# Altium footprint library PcbLib1.PcbLib: 21 footprints (part 1 of 2)
Each footprint in its own frame and in the unit in brackets; x right, y up, seen from the top. Pads: shape width x height; smd on the part's side, far side on the other; paste and mask are expansions set on the pad; w line width, h text height; cw(c..) or ccw(c..) is an arc to the next point about the centre after c.
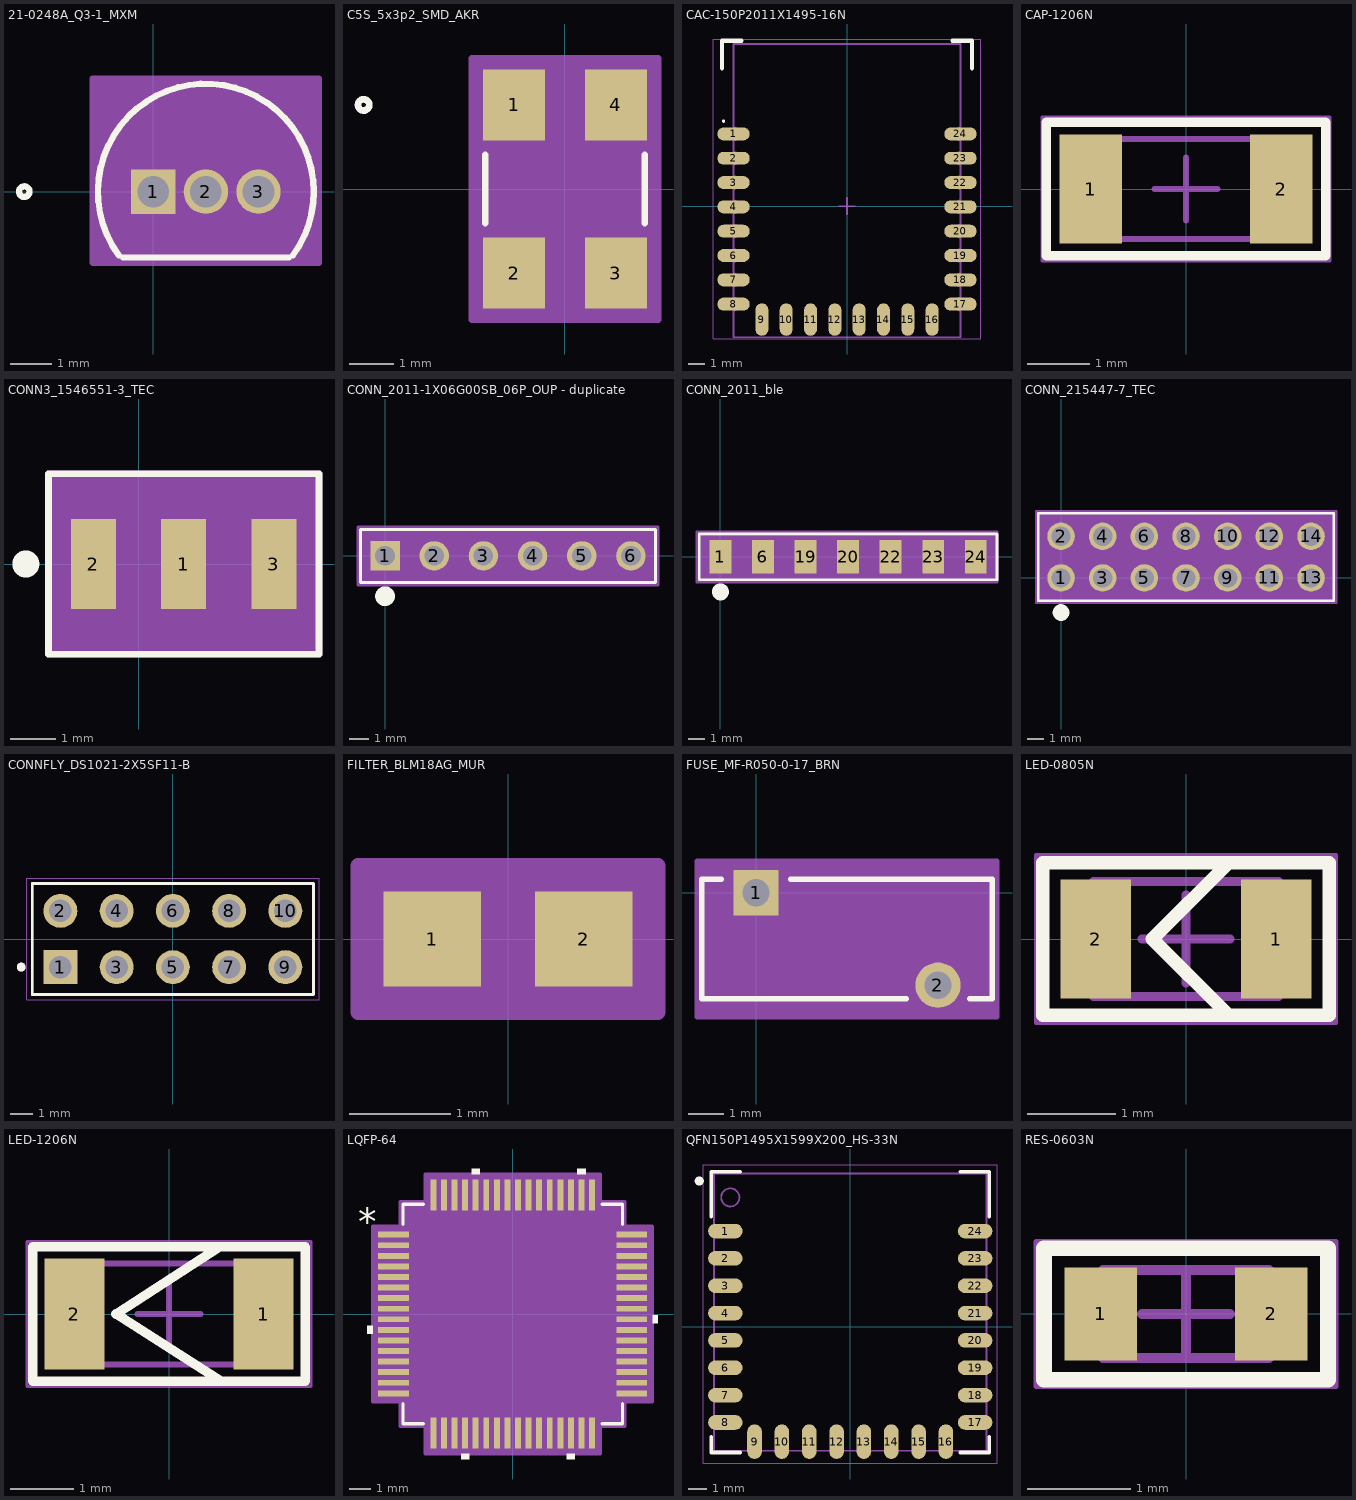
[diagram p0: the footprints below, top view; thin cyan lines are the x and y axes]

## 21-0248A_Q3-1_MXM [mm]
pads (3):
  rect 1.07x1.07 / inner round 1.524 / far side rect 1.07x1.07 hole 0.762 paste-2539.97 mask+0: 1(0,0)
  round 1.07 / inner round 1.524 / far side round 1.07 hole 0.762 paste-2539.97 mask+0: 2(1.27,0) 3(2.54,0)
Top Overlay:
  circle w0.152: c-3.111,0 r0.127
  lines w0.152: -0.833,-1.535 cw(c1.27,0) 3.873,0 cw(c1.27,0) 3.373,-1.535 ; -0.73,-1.587 3.27,-1.587
Mechanical 13:
  circle w0: c-0.953,0 r0.127
  lines w0: -0.73,-1.46 cw(c1.27,0) 3.27,-1.46
  lines w0.025: -0.73,-1.46 3.27,-1.46
  lines w0.152: -0.254,0 0.254,0 ; 0,-0.254 0,0.254
Mechanical 15:
  region: 4,-1.714 -1.46,-1.714 -1.46,2.73 4,2.73
  lines w0.152: -1.46,-1.714 -1.46,2.73 4,2.73 4,-1.714 -1.46,-1.714
3D body "21-0248A_Q3-1_MXM.step": height 8.95, standoff -0.57, extent -1.206,-0.952 3.746,2.476

## C5S_5x3p2_SMD_AKR [mm]
pads (4):
  rect 1.397x1.6 smd paste+0 mask+0: 1(-1.15,1.9) 2(-1.15,-1.9) 3(1.15,-1.9) 4(1.15,1.9)
Top Overlay:
  circle w0.152: c-4.549,1.9 r0.127
  lines w0.152: -1.803,-0.767 -1.803,0.767 ; 1.803,-0.767 1.803,0.767
Mechanical 13:
  circle w0: c-0.452,1.9 r0.076
  lines w0: -0.305,2.578 ccw(c0,2.578) 0.305,2.578
  lines w0.025: -1.676,-2.578 1.676,-2.578 1.676,2.578 -1.676,2.578 -1.676,-2.578
Mechanical 15:
  region: -1.93,-2.954 -2.103,-2.954 -2.103,2.954 -1.93,2.954 1.93,2.954 2.103,2.954 2.103,-2.954 1.93,-2.954
  lines w0.152: -2.103,-2.954 -2.103,2.954 -1.93,2.954 1.93,2.954 2.103,2.954 2.103,-2.954 1.93,-2.954 -1.93,-2.954 -2.103,-2.954
3D body "C5S_5x3p2_SMD_AKR.step": height 0.76, standoff 0, extent -1.676,-2.578 1.676,2.578

## CAC-150P2011X1495-16N [mm] "Chip Array, Concave, 16-Leads, Pitch 1,50mm,  Body 20,11x14,95mm,  IPC Medium Density"
height 1
pads (24):
  oval 2x0.8 smd: 1(-7,4.45) 2(-7,2.95) 3(-7,1.45) 4(-7,-0.05) 5(-7,-1.55) 6(-7,-3.05) 7(-7,-4.55) 8(-7,-6.05) 17(7,-6.05) 18(7,-4.55) 19(7,-3.05) 20(7,-1.55) 21(7,-0.05) 22(7,1.45) 23(7,2.95) 24(7,4.45)
  oval 0.8x2 smd: 9(-5.25,-7) 10(-3.75,-7) 11(-2.25,-7) 12(-0.75,-7) 13(0.75,-7) 14(2.25,-7) 15(3.75,-7) 16(5.25,-7)
Top Overlay:
  circle w0.1: c-7.612,5.238 r0.05
  lines w0.254: -7.7,8.5 -7.7,10.2 -6.5,10.2 ; 6.5,10.2 7.7,10.2 7.7,8.5
Top Assembly:
  lines w0.1: -7,-8.1 7,-8.1 7,-6.45 cw(c7,-6.05) 7,-5.65 7,-4.95 cw(c7,-4.55) 7,-4.15 7,-3.45 cw(c7,-3.05) 7,-2.65 7,-1.95 cw(c7,-1.55) 7,-1.15 7,-0.45 cw(c7,-0.05) 7,0.35 7,1.05 cw(c7,1.45) 7,1.85 7,2.55 cw(c7,2.95) 7,3.35 7,4.05 cw(c7,4.45) 7,4.85 7,10 -7,10 -7,4.85 cw(c-7,4.45) -7,4.05 -7,3.35 cw(c-7,2.95) -7,2.55 -7,1.85 cw(c-7,1.45) -7,1.05 -7,0.35 cw(c-7,-0.05) -7,-0.45 -7,-1.15 cw(c-7,-1.55) -7,-1.95 -7,-2.65 cw(c-7,-3.05) -7,-3.45 -7,-4.15 cw(c-7,-4.55) -7,-4.95 -7,-5.65 cw(c-7,-6.05) -7,-6.45 -7,-8.1
Top Courtyard:
  lines w0.05: -8.245,-8.2 8.245,-8.2 8.245,10.305 -8.245,10.305 -8.245,-8.2
  lines w0.1: -0.5,0 0.5,0 ; 0,-0.5 0,0.5

## CAP-1206N [mm] "Chip Capacitor, 2-Leads, Body 3,20x1,60mm, IPC Medium Density"
height 1.6
pads (2):
  rect 1x1.75 smd: 1(-1.525,0) 2(1.525,0)
Top Overlay:
  lines w0.152: -2.235,-1.067 -2.235,1.067 2.235,1.067 2.235,-1.067 1.067,-1.067 -0.233,-1.067 -2.235,-1.067
Top Assembly:
  lines w0.1: -1.6,-0.8 1.6,-0.8 1.6,0.8 -1.6,0.8 -1.6,-0.8
Top Courtyard:
  lines w0.05: -2.3,-1.15 2.3,-1.15 2.3,1.15 -2.3,1.15 -2.3,-1.15
  lines w0.1: -0.5,0 0.5,0 ; 0,-0.5 0,0.5
Top Designator:
  text ".Designator" at -4.998,-0.333 h1
3D body "CAP-1206N.step": height 1.6, standoff 0, extent -1.6,-0.8 1.6,0.8

## CONN3_1546551-3_TEC [mm]
pads (3):
  rect 1x2 smd paste-2539.97 mask+0: 1(1,0) 2(-1,0) 3(3,0)
Top Overlay:
  circle w0.3: c-2.5,0 r0.15
  lines w0.152: -2,-2 -2,2 4,2 4,-2 -2,-2
Mechanical 13:
  lines w0.025: -2,-2 -2,2 4,2 4,-2 -2,-2
Mechanical 15:
  region: 4,2 -1.954,2 -1.954,-2 4,-2
  region: 4,2 -1.5,2 -1.5,-2 4,-2
  lines w0.152: -2,-2 -2,2 4,2 4,-2 -2,-2

## CONN_2011-1X06G00SB_06P_OUP - duplicate [mil]
pads (6):
  rect 60x60 / inner round 60 / far side rect 60x60 hole 40 paste-99999 mask+0: 1(0,0)
  round 60 hole 40 paste-99999 mask+0: 2(100,0) 3(200,0) 4(300,0) 5(400,0) 6(500,0)
Top Overlay:
  circle w20: c0,-82 r10
  lines w6: -50,-54 550,-54 550,54 -50,54 -50,-54
Mechanical 13:
  circle w0: c0,-34 r10
  lines w1: -45,-49 545,-49 545,49 -45,49 -45,-49
Mechanical 15:
  region: 555,59 -55,59 -55,-59 555,-59
  lines w6: -55,-59 -55,59 555,59 555,-59 -55,-59
3D body "CONN_2011-1X06G00SB_06P_OUP.step": height 339.02, standoff -200, extent -50,-49.02 550,49.02

## CONN_2011_ble [mm]
pads (7):
  rect 1.3x2 smd paste-2539.97 mask+0: 1(0,0) 6(2.54,0) 19(5.08,0) 20(7.62,0) 22(10.16,0) 23(12.7,0) 24(15.24,0)
Top Overlay:
  circle w0.508: c0,-2.083 r0.254
  lines w0.152: -1.27,-1.372 16.51,-1.372 16.51,1.372 -1.27,1.372 -1.27,-1.372
Mechanical 13:
  circle w0: c0,-0.864 r0.254
  lines w0.025: -1.143,-1.245 13.843,-1.245 13.843,1.245 -1.143,1.245 -1.143,-1.245
Mechanical 15:
  region: 16.51,1.273 -1.27,1.273 -1.27,-1.325 16.51,-1.325
  lines w0.152: -1.397,-1.499 -1.397,1.499 16.51,1.499 16.51,-1.499 -1.397,-1.499

## CONN_215447-7_TEC [mil]
pads (14):
  round 66 / inner round 60 / far side round 66 hole 46 paste-99999 mask+0: 1(0,0) 2(0,100) 3(100,0) 4(100,100) 5(200,0) 6(200,100) 7(300,0) 8(300,100) 9(400,0) 10(400,100) 11(500,0) 12(500,100) 13(600,0) 14(600,100)
Top Overlay:
  circle w20: c0,-83 r10
  lines w6: -55,-55 655,-55 655,155 -55,155 -55,-55
Mechanical 13:
  circle w0: c0,-35 r10
  lines w1: -50,-50 650,-50 650,150 -50,150 -50,-50
  text "RefDes2" at 212.5,25 h50
Mechanical 15:
  region: 660,160 -60,160 -60,-60 660,-60
  lines w6: -60,-60 -60,160 660,160 660,-60 -60,-60
3D body "CONN_215447-7_TEC.step": height 140.94, standoff -437.05, extent -50.79,-50.39 649.21,149.61

## CONNFLY_DS1021-2X5SF11-B [mm]
pads (10):
  rect 1.53x1.53 / inner round 1.53 / far side rect 1.53x1.53 hole 1.02 mask+0.102: 1(-5.08,-1.27)
  round 1.53 hole 1.02 mask+0.102: 2(-5.08,1.27) 3(-2.54,-1.27) 4(-2.54,1.27) 5(0,-1.27) 6(0,1.27) 7(2.54,-1.27) 8(2.54,1.27) 9(5.08,-1.27) 10(5.08,1.27)
Top Overlay:
  circle w0.2: c-6.85,-1.27 r0.1
  lines w0.127: -6.35,-2.5 6.35,-2.5 6.35,2.5 -6.35,2.5 -6.35,-2.5
Mechanical 13:
  circle w0.2: c-6.85,-1.27 r0.1
  lines w0.127: -6.35,-2.5 -6.35,2.5 6.35,2.5 6.35,-2.5 -6.35,-2.5
Mechanical 15:
  lines w0.05: -6.6,-2.75 -6.6,2.75 6.6,2.75 6.6,-2.75 -6.6,-2.75
3D body "step_temp.STEP": height 8.6, standoff -3, extent -6.35,-2.5 6.35,2.5

## FILTER_BLM18AG_MUR [mil]
pads (2):
  rect 37.78x37 smd paste+0 mask+0: 1(-29.39,0) 2(29.39,0)
Top Layer keep-out:
  region: 0,0
Keep-Out Layer:
  region: 0,0
Mechanical 13:
  circle w1: c-24.39,0 r3
  lines w1: -34.5,-18.5 -34.5,18.5 ; -34.5,-18.5 -10.5,-18.5 -10.5,18.5 -34.5,18.5 ; -34.5,-18.5 34.5,-18.5 ; -34.5,-18.5 -34.5,18.5 ; -34.5,18.5 34.5,18.5 ; 34.5,-18.5 10.5,-18.5 10.5,18.5 34.5,18.5 ; 34.5,-18.5 34.5,18.5 ; 34.5,-18.5 34.5,18.5
Mechanical 15:
  region: 58.28,-28.5 -58.28,-28.5 -58.28,28.5 58.28,28.5
  lines w6: -58.28,-28.5 -58.28,28.5 58.28,28.5 58.28,-28.5 -58.28,-28.5
3D body "FILTER_BLM18AG_MUR.step": height 37.01, standoff 0, extent -34.49,-18.5 34.49,18.5

## FUSE_MF-R050-0-17_BRN [mm]
pads (2):
  rect 1.27x1.27 / inner round 1.524 / far side rect 1.27x1.27 hole 0.762 paste-2539.97 mask+0: 1(0,0)
  round 1.27 / inner round 1.524 / far side round 1.27 hole 0.762 paste-2539.97 mask+0: 2(5.1,-2.59)
Top Overlay:
  lines w0.152: -0.968,0.381 -1.527,0.381 -1.527,-2.971 4.211,-2.971 ; 0.968,0.381 6.627,0.381 6.627,-2.971 5.989,-2.971
Mechanical 13:
  lines w0.025: -1.4,-0.736 -0.409,0.254 ; -1.4,-2.844 -1.4,0.254 6.5,0.254 6.5,-2.844 -1.4,-2.844
Mechanical 15:
  region: 6.5,-2.844 -1.4,-2.844 -1.4,0.254 6.5,0.254
  region: 6.754,-3.479 -1.654,-3.479 -1.654,0.889 6.754,0.889
  lines w0.152: -1.654,-3.479 6.754,-3.479 6.754,0.889 -1.654,0.889 -1.654,-3.479
3D body "FUSE_MF-R050-0-17_BRN.step": height 13.15, standoff -1.35, extent -1.41,-2.854 6.49,0.314

## LED-0805N [mm] "Chip Resistor, 2-Leads, Body 2,10x1,30mm, IPC Medium Density"
height 0.5
pads (2):
  rect 0.8x1.35 smd: 1(1.025,0) 2(-1.025,0)
Top Overlay:
  lines w0.152: 0.483,-0.864 -0.381,0 0.483,0.864 ; 1.549,0.864 1.626,0.864 1.626,-0.864 -1.626,-0.864 -1.626,0.864 1.6,0.864
Top Assembly:
  lines w0.1: -1.05,-0.65 -1.05,0.65 1.05,0.65 1.05,-0.65 -1.05,-0.65
Top Courtyard:
  lines w0.05: -1.7,-0.95 -1.7,0.95 1.7,0.95 1.7,-0.95 -1.7,-0.95
  lines w0.1: -0.5,0 0.5,0 ; 0,-0.5 0,0.5
Top Designator:
  text ".Designator" at -3.999,-0.267 h0.8
3D body "led_0805 GREEN.step": height 1.1, standoff 0, extent -1.01,-0.625 1.01,0.625

## LED-1206N [mm]
height 0.55
pads (2):
  rect 0.95x1.75 smd: 1(1.5,0) 2(-1.5,0)
Top Overlay:
  lines w0.152: 0.813,1.067 -0.838,0 0.838,-1.067 ; 0.838,1.067 0.889,1.067 ; 1.88,1.067 2.159,1.067 2.159,-1.067 -1.981,-1.067 -2.159,-1.067 -2.159,1.067 2.007,1.067
Top Assembly:
  lines w0.1: -1.55,-0.8 1.55,-0.8 1.55,0.8 -1.55,0.8 -1.55,-0.8
Top Courtyard:
  lines w0.05: -2.25,-1.15 2.25,-1.15 2.25,1.15 -2.25,1.15 -2.25,-1.15
  lines w0.1: -0.5,0 0.5,0 ; 0,-0.5 0,0.5
Top Designator:
  text ".Designator" at -3.999,-0.267 h0.8
3D body: height 0.55, standoff 0, extent -1.55,-0.8 -1.1,0.8
3D body: height 0.55, standoff 0, extent 1.1,-0.8 1.55,0.8
3D body: height 0.55, standoff 0, extent -1.1,-0.8 1.1,0.8

## LQFP-64 [mil]
pads (64):
  rect 57.56x11 smd paste+0 mask+0: 1(-221.5,147.64) 2(-221.5,127.95) 3(-221.5,108.27) 4(-221.5,88.58) 5(-221.5,68.9) 6(-221.5,49.21) 7(-221.5,29.53) 8(-221.5,9.84) 9(-221.5,-9.84) 10(-221.5,-29.53) 11(-221.5,-49.21) 12(-221.5,-68.9) 13(-221.5,-88.58) 14(-221.5,-108.27) 15(-221.5,-127.95) 16(-221.5,-147.64) 33(221.5,-147.64) 34(221.5,-127.95) 35(221.5,-108.27) 36(221.5,-88.58) 37(221.5,-68.9) 38(221.5,-49.21) 39(221.5,-29.53) 40(221.5,-9.84) 41(221.5,9.84) 42(221.5,29.53) 43(221.5,49.21) 44(221.5,68.9) 45(221.5,88.58) 46(221.5,108.27) 47(221.5,127.95) 48(221.5,147.64)
  rect 11x57.56 smd paste+0 mask+0: 17(-147.64,-221.5) 18(-127.95,-221.5) 19(-108.27,-221.5) 20(-88.58,-221.5) 21(-68.9,-221.5) 22(-49.21,-221.5) 23(-29.53,-221.5) 24(-9.84,-221.5) 25(9.84,-221.5) 26(29.53,-221.5) 27(49.21,-221.5) 28(68.9,-221.5) 29(88.58,-221.5) 30(108.27,-221.5) 31(127.95,-221.5) 32(147.64,-221.5) 49(147.64,221.5) 50(127.95,221.5) 51(108.27,221.5) 52(88.58,221.5) 53(68.9,221.5) 54(49.21,221.5) 55(29.53,221.5) 56(9.84,221.5) 57(-9.84,221.5) 58(-29.53,221.5) 59(-49.21,221.5) 60(-68.9,221.5) 61(-88.58,221.5) 62(-108.27,221.5) 63(-127.95,221.5) 64(-147.64,221.5)
Top Overlay:
  region: -260.28,-22.03 -270.28,-22.03 -270.28,-37.03 -260.28,-37.03
  region: -81.08,-260.28 -96.08,-260.28 -96.08,-270.28 -81.08,-270.28
  region: 115.77,-260.28 100.77,-260.28 100.77,-270.28 115.77,-270.28
  region: 260.28,-2.34 270.28,-2.34 270.28,-17.34 260.28,-17.34
  region: 135.45,260.28 120.45,260.28 120.45,270.28 135.45,270.28
  region: -61.4,260.28 -76.4,260.28 -76.4,270.28 -61.4,270.28
  lines w6: -204,-166.24 -204,-204 -166.24,-204 ; -204,166.24 -204,204 -166.24,204 ; 166.24,-204 204,-204 204,-166.24 ; 166.24,204 204,204 204,166.24
  text "*" at -287.78,147.48 h50
Mechanical 13:
  drawing of 261 lines, arcs and shapes, not listed
  text "*" at -196.5,132.48 h50
Mechanical 15:
  region: -163.14,-209 -209,-209 -209,-163.14 -260.28,-163.14 -260.28,163.14 -209,163.14 -209,209 -163.14,209 -163.14,260.28 163.14,260.28 163.14,209 209,209 209,163.14 260.28,163.14 260.28,-163.14 209,-163.14 209,-209 163.14,-209 163.14,-260.28 -163.14,-260.28
  lines w6: -260.28,-163.14 -209,-163.14 -209,-209 -163.14,-209 -163.14,-260.28 163.14,-260.28 163.14,-209 209,-209 209,-163.14 260.28,-163.14 260.28,163.14 209,163.14 209,209 163.14,209 163.14,260.28 -163.14,260.28 -163.14,209 -209,209 -209,163.14 -260.28,163.14 -260.28,-163.14
3D body "LQFP-64.step": height 63.11, standoff 0, extent -236.5,-236.5 236.5,236.5

## QFN150P1495X1599X200_HS-33N [mm] "QFN, 32-Leads, Body 14,95x15,99mm, Pitch 1,50mm, Thermal Pad 11,30x11,30mm, IPC Medium Density"
height 2
pads (24):
  oval 1.9x0.8 smd: 1(-6.85,5.25) 2(-6.85,3.75) 3(-6.85,2.25) 4(-6.85,0.75) 5(-6.85,-0.75) 6(-6.85,-2.25) 7(-6.85,-3.75) 8(-6.85,-5.25) 17(6.85,-5.25) 18(6.85,-3.75) 19(6.85,-2.25) 20(6.85,-0.75) 21(6.85,0.75) 22(6.85,2.25) 23(6.85,3.75) 24(6.85,5.25)
  oval 0.8x1.9 smd: 9(-5.25,-6.3) 10(-3.75,-6.3) 11(-2.25,-6.3) 12(-0.75,-6.3) 13(0.75,-6.3) 14(2.25,-6.3) 15(3.75,-6.3) 16(5.25,-6.3)
Top Overlay:
  circle w0.25: c-8.28,7.995 r0.125
  lines w0.2: -7.63,-6.05 -7.63,-6.9 -6.05,-6.9 ; -7.63,6.05 -7.63,8.5 -6.05,8.5 ; 6.05,-6.9 7.63,-6.9 7.63,-6.05 ; 6.05,8.5 7.63,8.5 7.63,6.05
Top Assembly:
  circle w0.1: c-6.58,7.095 r0.5
  lines w0.1: -7.48,-6.8 7.48,-6.8 7.48,8.4 -7.48,8.4 -7.48,-6.8
Top Courtyard:
  lines w0.05: -8.05,-7.5 8.05,-7.5 8.05,8.9 -8.05,8.9 -8.05,-7.5

## RES-0603N [mm] "Chip Resistor, 2-Leads, Body 1,60x0,85mm, IPC Medium Density"
height 0.45
pads (2):
  rect 0.7x0.9 smd: 1(-0.825,0) 2(0.825,0)
Top Overlay:
  lines w0.152: -1.372,-0.635 -1.372,0.635 1.372,0.635 1.372,-0.635 -1.346,-0.635
Top Assembly:
  lines w0.1: -0.8,-0.425 -0.8,0.425 0.8,0.425 0.8,-0.425 -0.8,-0.425
Top Courtyard:
  lines w0.05: -1.45,-0.7 -1.45,0.7 1.45,0.7 1.45,-0.7 -1.45,-0.7
  lines w0.1: -0.425,0 0.425,0 ; 0,-0.425 0,0.425
3D body "RESC1608X04N.step": height 0.45, standoff 0, extent -0.8,-0.425 0.8,0.425